# Altium footprint library custom-case.PcbLib: 483 footprints (part 31 of 31)
Each footprint in its own frame and in the unit in brackets; x right, y up, seen from the top. Pads: shape width x height; smd on the part's side, far side on the other; paste and mask are expansions set on the pad; w line width, h text height; cw(c..) or ccw(c..) is an arc to the next point about the centre after c.
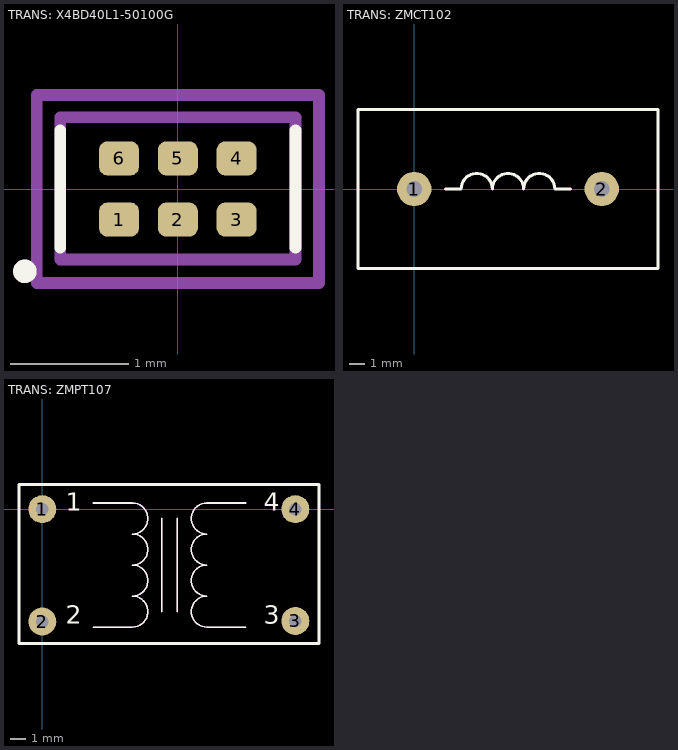
[diagram p30: the footprints below, top view; thin cyan lines are the x and y axes]

## TRANS: X4BD40L1-50100G [mm]
pads (6):
  rrect50% 0.34x0.29 smd: 1(-0.5,-0.26) 2(0,-0.26) 3(0.5,-0.26) 4(0.5,0.26) 5(0,0.26) 6(-0.5,0.26)
Top Overlay:
  circle w0.1: c-1.3,-0.7 r0.05
  lines w0.1: -1,-0.5 -1,0.5 ; 1,-0.5 1,0.5
Top Assy:
  circle w0.1: c-1.3,-0.7 r0.05
  lines w0.1: -1,-0.6 1,-0.6 1,0.61 -1,0.61 -1,-0.6
Size Area:
  lines w0.1: -1.2,-0.8 1.2,-0.8 1.2,0.8 -1.2,0.8 -1.2,-0.8
3D body "X4BD40L1-50100G.step": height 0.58, standoff 0.02, extent -0.844,-0.47 0.844,0.47

## TRANS: ZMCT102 [mm]
pads (2):
  round 2.2 hole 1 mask+0.075: 1(0,0) 2(12,0)
Top Overlay:
  lines w0.2: 2,0 3,0 cw(c4,0) 5,0 cw(c6,0) 7,0 cw(c8,0) 9,0 10,0 ; -3.6,-5.1 -3.6,5.1 15.6,5.1 15.6,-5.1 -3.6,-5.1
Top Assy:
  lines w0.1: 2,0 3,0 cw(c4,0) 5,0 cw(c6,0) 7,0 cw(c8,0) 9,0 10,0 ; -3.6,-5.1 -3.6,5.1 15.6,5.1 15.6,-5.1 -3.6,-5.1
Size Area:
  lines w0.1: -3.6,-5.1 -3.6,5.1 15.6,5.1 15.6,-5.1 -3.6,-5.1
3D body "ZMCT102 v2.step": height 19.7, standoff -3.9, extent -3.6,-5.1 15.6,5.1

## TRANS: ZMPT107 [mm]
pads (4):
  round 1.8 hole 0.8: 1(0,0) 2(0,-7.239) 3(16.3,-7.2) 4(16.3,0)
Top Overlay:
  lines w0.1: 3.3,-7.6 5.8,-7.6 ccw(c5.8,-6.6) 5.8,-5.6 ccw(c5.8,-4.6) 5.8,-3.6 ccw(c5.8,-2.6) 5.8,-1.6 ccw(c5.8,-0.6) 5.8,0.4 3.3,0.4 ; 7.7,-6.6 7.7,-0.6 ; 8.7,-6.6 8.7,-0.6 ; 13.1,-7.6 10.6,-7.6 cw(c10.6,-6.6) 10.6,-5.6 cw(c10.6,-4.6) 10.6,-3.6 cw(c10.6,-2.6) 10.6,-1.6 cw(c10.6,-0.6) 10.6,0.4 13.1,0.4
  lines w0.2: 9.95,1.589 17.825,1.589 17.825,-8.645 14.247,-8.645 ; 10.033,1.589 -1.5,1.589 -1.5,-8.65 5.268,-8.65 11.332,-8.65 14.247,-8.65
  text "3" at 14.25,-7.75 h2
  text "4" at 14.25,-0.5 h2
  text "2" at 1.5,-7.75 h2
  text "1" at 1.5,-0.5 h2
Top Assy:
  lines w0.1: 3.3,-7.6 5.8,-7.6 ccw(c5.8,-6.6) 5.8,-5.6 ccw(c5.8,-4.6) 5.8,-3.6 ccw(c5.8,-2.6) 5.8,-1.6 ccw(c5.8,-0.6) 5.8,0.4 3.3,0.4 ; 7.7,-6.6 7.7,-0.6 ; 8.7,-6.6 8.7,-0.6 ; 13.1,-7.6 10.6,-7.6 cw(c10.6,-6.6) 10.6,-5.6 cw(c10.6,-4.6) 10.6,-3.6 cw(c10.6,-2.6) 10.6,-1.6 cw(c10.6,-0.6) 10.6,0.4 13.1,0.4 ; -1.5,-8.65 -1.5,1.575 17.825,1.575 17.825,-8.65 -1.5,-8.65
  text "4" at 14.25,-0.5 h2
  text "3" at 14.25,-7.75 h2
  text "2" at 1.5,-7.75 h2
  text "1" at 1.5,-0.5 h2
Size Area:
  lines w0.1: -1.5,-8.65 17.825,-8.65 17.825,1.575 -1.5,1.575 -1.5,-8.65
3D body "User Library-ZMPT107.STEP": height 18.2, standoff -5.25, extent -1.495,-8.636 17.805,1.564